# Altium schematic symbol library Sierrathon.SchLib: 20 symbols
Pins are listed as number, name and electrical type; pins without a type are passive.

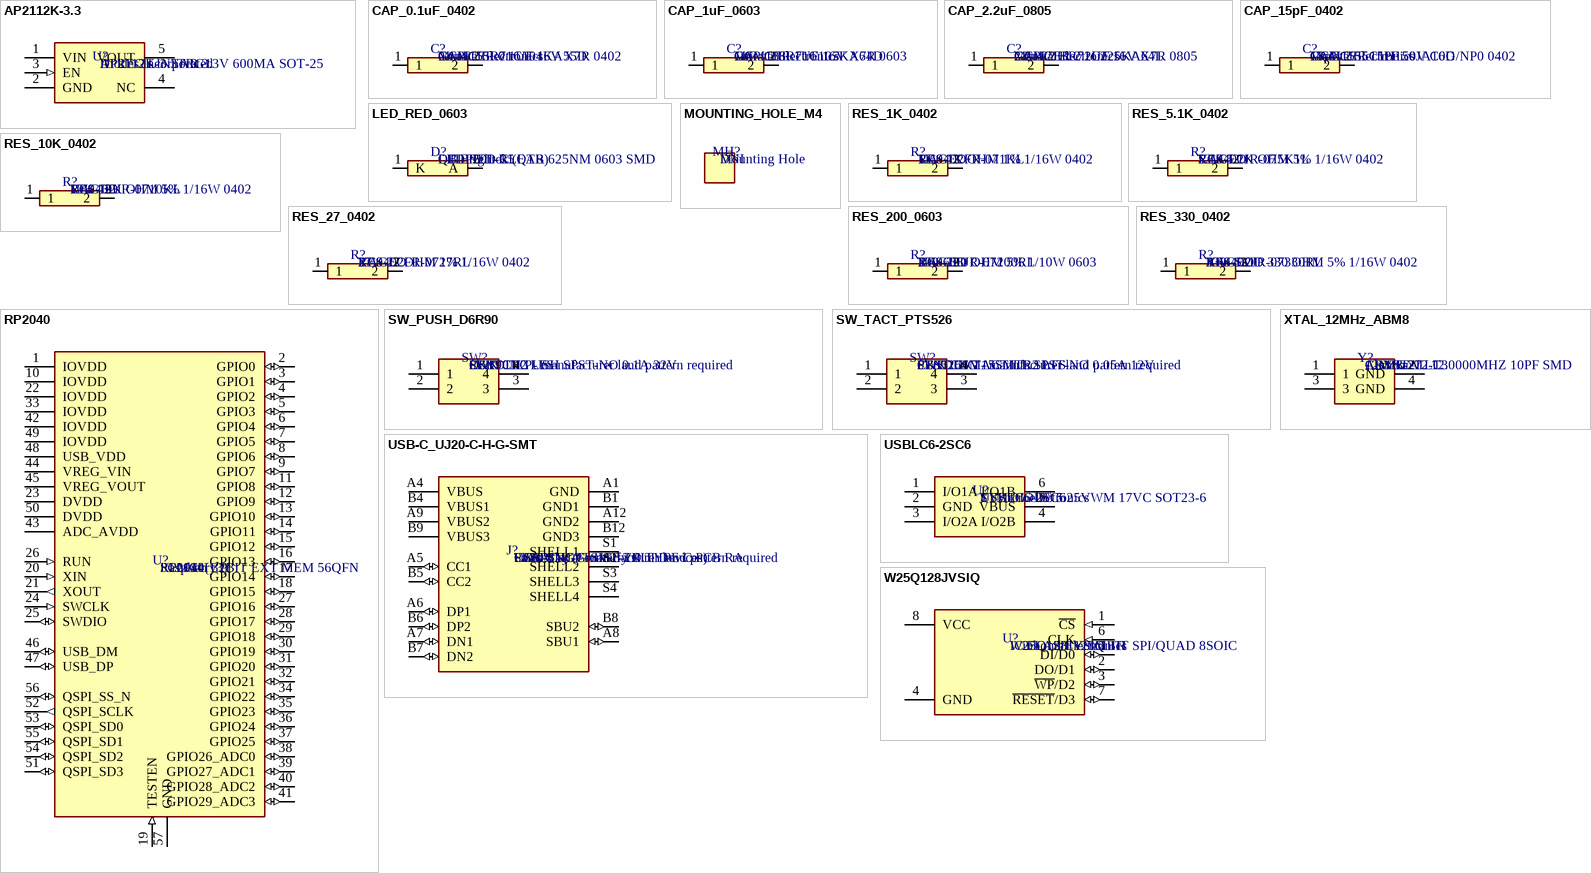
[diagram p0: symbols AP2112K-3.3 to XTAL_12MHz_ABM8]

## AP2112K-3.3
designator U?  value AP2112  Manufacturer: Diodes Incorporated  Manufacturer Part Number: AP2112K-3.3TRG1
IC REG LINEAR 3.3V 600MA SOT-25
footprint SOT95P280X145-5N
pins: 1 VIN (power), 2 GND (power), 3 EN (in), 4 NC, 5 VOUT (power)

## CAP_0.1uF_0402
designator C?  value 0.1uF  Manufacturer: Murata Electronics  Manufacturer Part Number: GCM155R71C104KA55D
CAP CER 0.1UF 16V X7R 0402
footprint CAPC1005X55N
pins: 1, 2

## CAP_1uF_0603
designator C?  value 1uF  Manufacturer: Murata Electronics  Manufacturer Part Number: GCM188R71C105KA64D
CAP CER 1UF 16V X7R 0603
footprint CAPC1608X87N
pins: 1, 2

## CAP_2.2uF_0805
designator C?  value 2.2uF  Manufacturer: Murata Electronics  Manufacturer Part Number: GCM21BR71C225KA64L
CAP CER 2.2UF 16V X7R 0805
footprint CAPC2012X125N
pins: 1, 2

## CAP_15pF_0402
designator C?  value 15pF  Manufacturer: Murata Electronics  Manufacturer Part Number: GCM1555C1H150JA16D
CAP CER 15PF 50V C0G/NP0 0402
footprint CAPC1005X55N
pins: 1, 2

## LED_RED_0603
designator D?  value LED  Manufacturer: QT Brightek (QTB)  Manufacturer Part Number: QBLP601-R5
LED RED CLEAR 625NM 0603 SMD
footprint LEDC1608X80N
pins: 1 K, 2 A

## MOUNTING_HOLE_M4
designator MH?  value Mounting Hole
Mounting Hole M4 (DNI); DNI: DNI
footprint MH_M4_NPTH

## RES_1K_0402
designator R?  value 1K  Manufacturer: YAGEO  Manufacturer Part Number: RC0402FR-071KL
RES 1K OHM 1% 1/16W 0402
footprint RESC1005X40N
pins: 1, 2

## RES_5.1K_0402
designator R?  value 5.1K  Manufacturer: YAGEO  Manufacturer Part Number: RC0402JR-075K1L
RES 5.1K OHM 5% 1/16W 0402
footprint RESC1005X40N
pins: 1, 2

## RES_10K_0402
designator R?  value 10K  Manufacturer: YAGEO  Manufacturer Part Number: RC0402JR-0710KL
RES 10K OHM 5% 1/16W 0402
footprint RESC1005X40N
pins: 1, 2

## RES_27_0402
designator R?  value 27  Manufacturer: YAGEO  Manufacturer Part Number: RC0402FR-0727RL
RES 27 OHM 1% 1/16W 0402
footprint RESC1005X40N
pins: 1, 2

## RES_200_0603
designator R?  value 200  Manufacturer: YAGEO  Manufacturer Part Number: RC0603JR-07200RL
RES 200 OHM 5% 1/10W 0603
footprint RESC1608X55N
pins: 1, 2

## RES_330_0402
designator R?  value 330  Manufacturer: YAGEO  Manufacturer Part Number: AF0402JR-07330RL
RES SMD 330 OHM 5% 1/16W 0402
footprint RESC1005X40N
pins: 1, 2

## RP2040
designator U?  value RP2040  Manufacturer: Raspberry Pi  Manufacturer Part Number: SC0914(13)
IC MCU 32BIT EXT MEM 56QFN
footprint QFN40P700X700X90-57N
pins: 1 IOVDD (power), 2 GPIO0 (io), 3 GPIO1 (io), 4 GPIO2 (io), 5 GPIO3 (io), 6 GPIO4 (io), 7 GPIO5 (io), 8 GPIO6 (io), 9 GPIO7 (io), 10 IOVDD (power), 11 GPIO8 (io), 12 GPIO9 (io), 13 GPIO10 (io), 14 GPIO11 (io), 15 GPIO12 (io), 16 GPIO13 (io), 17 GPIO14 (io), 18 GPIO15 (io), 19 TESTEN (in), 20 XIN (in), 21 XOUT (out), 22 IOVDD (power), 23 DVDD (power), 24 SWCLK (in), 25 SWDIO (io), 26 RUN (in), 27 GPIO16 (io), 28 GPIO17 (io), 29 GPIO18 (io), 30 GPIO19 (io), 31 GPIO20 (io), 32 GPIO21 (io), 33 IOVDD (power), 34 GPIO22 (io), 35 GPIO23 (io), 36 GPIO24 (io), 37 GPIO25 (io), 38 GPIO26_ADC0 (io), 39 GPIO27_ADC1 (io), 40 GPIO28_ADC2 (io), 41 GPIO29_ADC3 (io), 42 IOVDD (power), 43 ADC_AVDD (power), 44 VREG_VIN (power), 45 VREG_VOUT (power), 46 USB_DM (io), 47 USB_DP (io), 48 USB_VDD (power), 49 IOVDD (power), 50 DVDD (power), 51 QSPI_SD3 (io), 52 QSPI_SCLK (out), 53 QSPI_SD0 (io), 54 QSPI_SD2 (io), 55 QSPI_SD1 (io), 56 QSPI_SS_N (io), 57 GND (power)

## SW_PUSH_D6R90
designator SW?  value SWITCH  Manufacturer: C&K  Manufacturer Part Number: D6R90 F2 LFS  Footprint Status: PENDING - manufacturer land pattern required
SWITCH PUSH SPST-NO 0.1A 32V
pins: 1, 2, 3, 4

## SW_TACT_PTS526
designator SW?  value PTS526  Manufacturer: C&K  Manufacturer Part Number: PTS526SM15SMTR2 LFS  Footprint Status: PENDING - manufacturer land pattern required
SWITCH TACTILE SPST-NO 0.05A 12V
pins: 1, 2, 3, 4

## USB-C_UJ20-C-H-G-SMT
designator J?  value USB-C  Manufacturer: Same Sky (Formerly CUI Devices)  Manufacturer Part Number: UJ20-C-H-G-SMT-TR  Footprint Status: PENDING - manufacturer land pattern required
CONN RCPT USB 2.0 TYPE C PCB RA
pins: A1 GND (power), A4 VBUS (power), A5 CC1 (io), A6 DP1 (io), A7 DN1 (io), A8 SBU1 (io), A9 VBUS2 (power), A12 GND2 (power), B1 GND1 (power), B4 VBUS1 (power), B5 CC2 (io), B6 DP2 (io), B7 DN2 (io), B8 SBU2 (io), B9 VBUS3 (power), B12 GND3 (power), S1 SHELL1, S2 SHELL2, S3 SHELL3, S4 SHELL4

## USBLC6-2SC6
designator U?  value USBLC6-2SC6  Manufacturer: STMicroelectronics
TVS DIODE 5.25VWM 17VC SOT23-6; Manufacturer Part Number: USBLC6-2SC6
footprint SOT95P280X145-6N
pins: 1 I/O1A, 2 GND (power), 3 I/O2A, 4 I/O2B, 5 VBUS (power), 6 I/O1B

## W25Q128JVSIQ
designator U?  value W25Q128JVSIQ  Manufacturer: Winbond Electronics  Manufacturer Part Number: W25Q128JVSIQ TR
IC FLASH 128MBIT SPI/QUAD 8SOIC
footprint SOIC127P790X216-8N
pins: 1 ~{CS} (in), 2 DO/D1 (io), 3 ~{WP}/D2 (io), 4 GND (power), 5 DI/D0 (io), 6 CLK (in), 7 ~{RESET}/D3 (io), 8 VCC (power)

## XTAL_12MHz_ABM8
designator Y?  value 12MHz  Manufacturer: Abracon LLC  Manufacturer Part Number: ABM8-272-T3
CRYSTAL 12.0000MHZ 10PF SMD
footprint XTAL_3225-4
pins: 1, 2 GND, 3, 4 GND